# Altium footprint library CSAT-M15RD30-PB.PcbLib: 1 footprints
Each footprint in its own frame and in the unit in brackets; x right, y up, seen from the top. Pads: shape width x height; smd on the part's side, far side on the other; paste and mask are expansions set on the pad; w line width, h text height; cw(c..) or ccw(c..) is an arc to the next point about the centre after c.
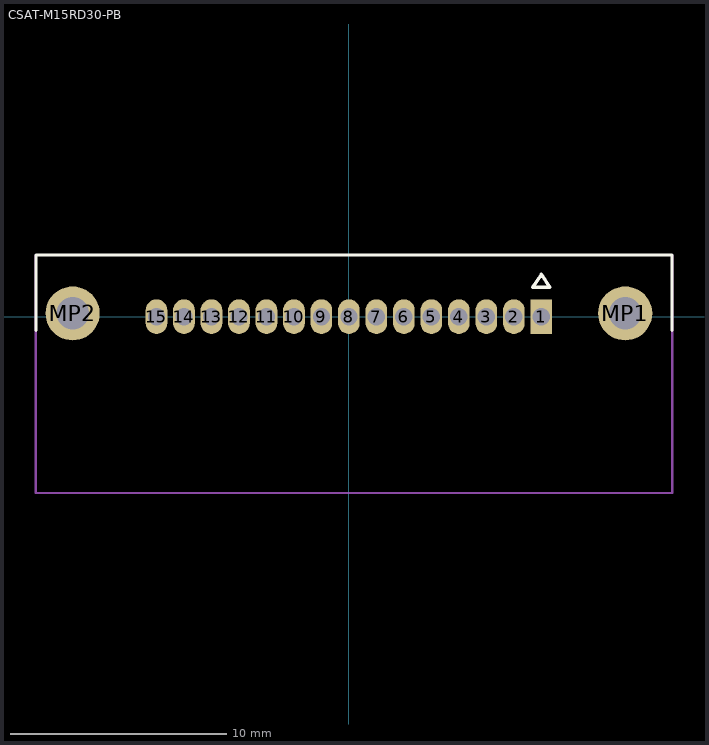
[diagram p0: the footprint, top view; thin cyan lines are the x and y axes]

## CSAT-M15RD30-PB [mm] "Conn-Link SATA Power 15P male RA DIP; drawing CSAT-M07-H0B Rev A, PCB 1.60 mm"
height 4
pads (17):
  rect 1x1.6 hole 0.8: 1(8.89,0)
  oval 1x1.6 hole 0.8: 2(7.62,0) 3(6.35,0) 4(5.08,0) 5(3.81,0) 6(2.54,0) 7(1.27,0) 8(0,0) 9(-1.27,0) 10(-2.54,0) 11(-3.81,0) 12(-5.08,0) 13(-6.35,0) 14(-7.62,0) 15(-8.89,0)
  round 2.5 hole 1.5: MP1(12.765,0.15) MP2(-12.765,0.15)
Top Overlay:
  lines w0.14: -14.465,-0.65 -14.465,2.85 14.935,2.85 14.935,-0.65
  lines w0.16: 8.49,1.35 9.29,1.35 8.89,1.95 8.49,1.35
Mechanical 1:
  lines w0.1: -14.465,-8.15 14.935,-8.15 14.935,2.85 -14.465,2.85 -14.465,-8.15
3D body "CSAT-M15RD30-PB.step": height 4, standoff -2.68, extent -14.465,-8.155 14.935,2.845